# Altium footprint library TN1215600BTR.PcbLib: 1 footprints
Each footprint in its own frame and in the unit in brackets; x right, y up, seen from the top. Pads: shape width x height; smd on the part's side, far side on the other; paste and mask are expansions set on the pad; w line width, h text height; cw(c..) or ccw(c..) is an arc to the next point about the centre after c.
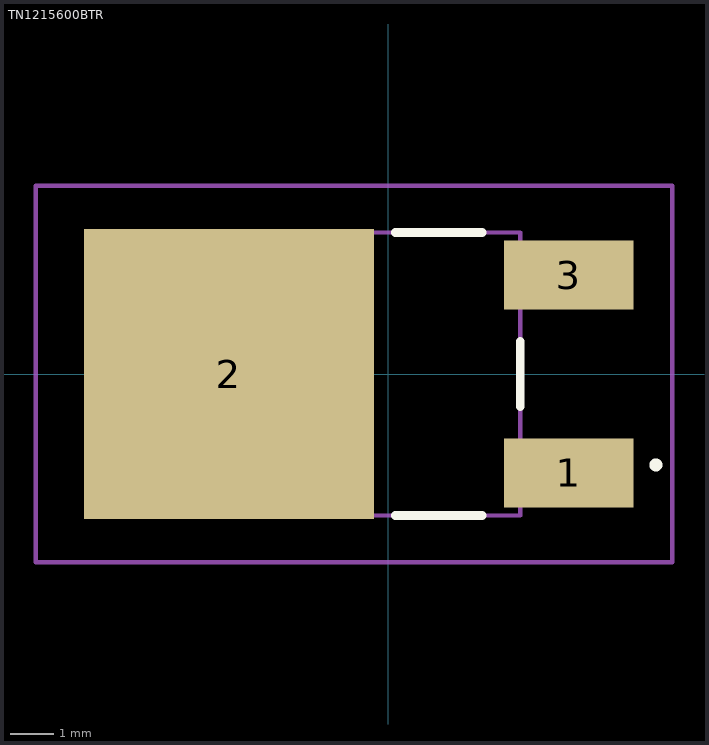
[diagram p0: the footprint, top view; thin cyan lines are the x and y axes]

## TN1215600BTR [mm]
pads (3):
  rect 3x1.6 smd: 1(4.168,-2.286) 3(4.168,2.286)
  rect 6.7x6.7 smd: 2(-3.683,0)
Top Overlay:
  lines w0.2: 0.167,-3.27 2.167,-3.27 ; 0.167,3.27 2.167,3.27 ; 3.048,-0.75 3.048,0.75 ; 6.133,-2.1 6.133,-2.1 ; 6.132,-2.1 ccw(c6.182,-2.1) 6.232,-2.1 ; 6.132,-2.1 cw(c6.182,-2.1) 6.232,-2.1 ; 6.133,-2.1 6.133,-2.1 ; 6.132,-2.1 ccw(c6.182,-2.1) 6.232,-2.1 ; 6.232,-2.1 6.232,-2.1
Mechanical 15:
  lines w0.1: -3.047,-3.27 3.048,-3.27 3.048,3.27 -3.047,3.27 -3.047,-3.27
Mechanical 20:
  lines w0.1: -8.143,-4.35 6.558,-4.35 6.558,4.35 -8.143,4.35 -8.143,-4.35